# Altium footprint library 300yuan.PcbLib: 3 footprints
Each footprint in its own frame and in the unit in brackets; x right, y up, seen from the top. Pads: shape width x height; smd on the part's side, far side on the other; paste and mask are expansions set on the pad; w line width, h text height; cw(c..) or ccw(c..) is an arc to the next point about the centre after c.
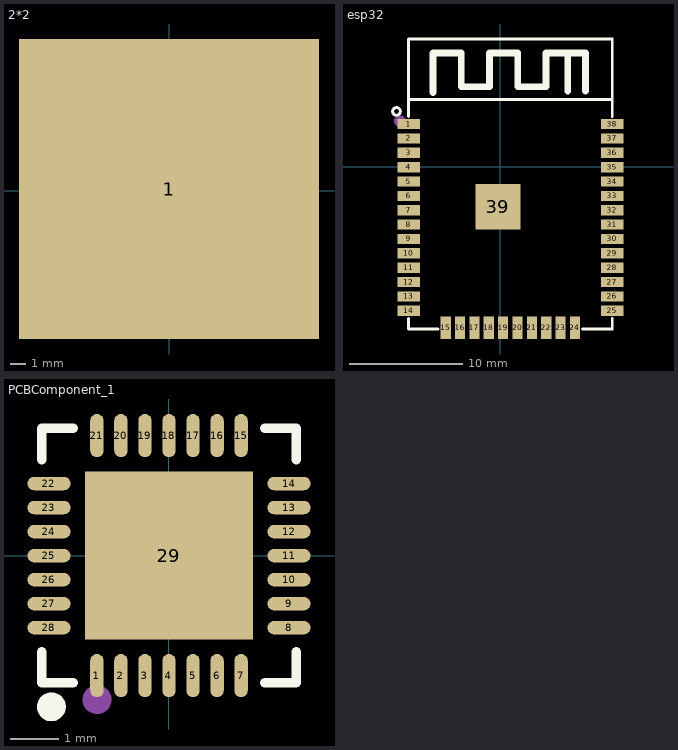
[diagram p0: the footprints below, top view; thin cyan lines are the x and y axes]

## 2*2 [mm]
pads (1):
  rect 20x20 smd: 1(0,0.127)

## esp32 [mm]
pads (39):
  rect 2x0.9 smd: 1(-8.113,3.77) 2(-8.113,2.5) 3(-8.113,1.23) 4(-8.113,-0.04) 5(-8.113,-1.31) 6(-8.113,-2.58) 7(-8.113,-3.85) 8(-8.113,-5.12) 9(-8.113,-6.39) 10(-8.113,-7.66) 11(-8.113,-8.93) 12(-8.113,-10.2) 13(-8.113,-11.47) 14(-8.113,-12.74) 25(9.887,-12.74) 26(9.887,-11.47) 27(9.887,-10.2) 28(9.887,-8.93) 29(9.887,-7.66) 30(9.887,-6.39) 31(9.887,-5.12) 32(9.887,-3.85) 33(9.887,-2.58) 34(9.887,-1.31) 35(9.887,-0.04) 36(9.887,1.23) 37(9.887,2.5) 38(9.887,3.77)
  rect 0.9x2 smd: 15(-4.828,-14.24) 16(-3.558,-14.24) 17(-2.288,-14.24) 18(-1.018,-14.24) 19(0.252,-14.24) 20(1.522,-14.24) 21(2.792,-14.24) 22(4.062,-14.24) 23(5.332,-14.24) 24(6.602,-14.24)
  rect 4x4 smd: 39(-0.213,-3.546)
Top Overlay:
  circle w0.254: c-9.183,4.892 r0.342
  lines w0.254: -8.13,-13.421 -8.13,-14.366 -5.509,-14.366 ; -8.13,4.451 -8.13,10.834 -8.13,11.3 9.907,11.3 9.907,10.834 ; -8.13,5.934 9.904,5.934 ; 7.283,-14.366 9.904,-14.366 9.904,-13.421 ; 9.904,4.451 9.904,10.834
  lines w0.6: -5.963,6.57 -5.963,10.07 -3.463,10.07 ; -3.464,10.069 -3.464,7.069 -0.962,7.069 -0.962,10.069 1.537,10.069 1.537,7.069 4.037,7.069 4.037,10.069 7.537,10.069 7.537,6.702 ; 5.967,6.702 5.967,10.069
Mechanical 15:
  circle w0.5: c-8.893,4.042 r0.25

## PCBComponent_1 [mm]
pads (29):
  oval 0.28x0.9 smd: 1(-1.501,-2.5) 2(-1.001,-2.5) 3(-0.5,-2.5) 4(0,-2.5) 5(0.5,-2.5) 6(1.001,-2.5) 7(1.501,-2.5) 15(1.501,2.5) 16(1.001,2.5) 17(0.5,2.5) 18(0,2.5) 19(-0.5,2.5) 20(-1.001,2.5) 21(-1.501,2.5)
  oval 0.9x0.28 smd: 8(2.5,-1.501) 9(2.5,-1.001) 10(2.5,-0.5) 11(2.5,0) 12(2.5,0.5) 13(2.5,1.001) 14(2.5,1.501) 22(-2.5,1.501) 23(-2.5,1.001) 24(-2.5,0.5) 25(-2.5,0) 26(-2.5,-0.5) 27(-2.5,-1.001) 28(-2.5,-1.501)
  rect 3.5x3.5 smd: 29(0,0)
Top Overlay:
  lines w0.2: -2.65,-2 -2.65,-2.65 -2,-2.65 ; -2.65,2 -2.65,2.65 -2,2.65 ; 2,-2.65 2.65,-2.65 2.65,-2 ; 2,2.65 2.65,2.65 2.65,2
  lines w0.3: -2.451,-3 ccw(c-2.45,-3.15) -2.449,-3
Mechanical 15:
  circle w0.3: c-1.5,-3 r0.15